# Altium schematic symbol library MOC3023M.SchLib: 1 symbol
Pins are listed as number, name and electrical type; pins without a type are passive.

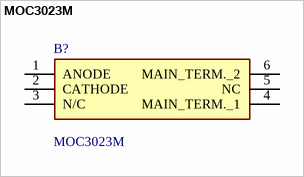
[diagram p0: symbol MOC3023M]

## MOC3023M
designator B?
UL1577, 4,170 VACRMS for 1 Minute;  Excellent IFT Stability - IR Emitting Diode Has Low Degradation Peak Blocking Voltage; 400 V - MOC302XM Safety and Regulatory Approvals; DIN EN/IEC60747-5-5); 250 V - MOC301XM; Manufacturer_Name: onsemi; Geometry.Height: 5.08mm; Manufacturer_Part_Number: MOC3023M; Mouser Part Number: 512-MOC3023M; Mouser Price/Stock: https://www.mouser.co.uk/ProductDetail/onsemi-Fairchild/MOC3023M?qs=yRUxxYa83cjcpuqK%2Fq2htA%3D%3D; Arrow Part Number: MOC3023M; Arrow Price/Stock: https://www.arrow.com/en/products/moc3023m/on-semiconductor?utm_currency=USD&region=europe; Datasheet Link: https://www.onsemi.com/pub/Collateral/MOC3023M-D.PDF
footprint DIP762W51P254L851H508Q6N
pins: 1 ANODE, 2 CATHODE, 3 N/C, 4 MAIN_TERM._1, 5 NC, 6 MAIN_TERM._2